# Altium footprint library USB Connectors WR-COM.PcbLib: 48 footprints (part 3 of 3)
Each footprint in its own frame and in the unit in brackets; x right, y up, seen from the top. Pads: shape width x height; smd on the part's side, far side on the other; paste and mask are expansions set on the pad; w line width, h text height; cw(c..) or ccw(c..) is an arc to the next point about the centre after c.
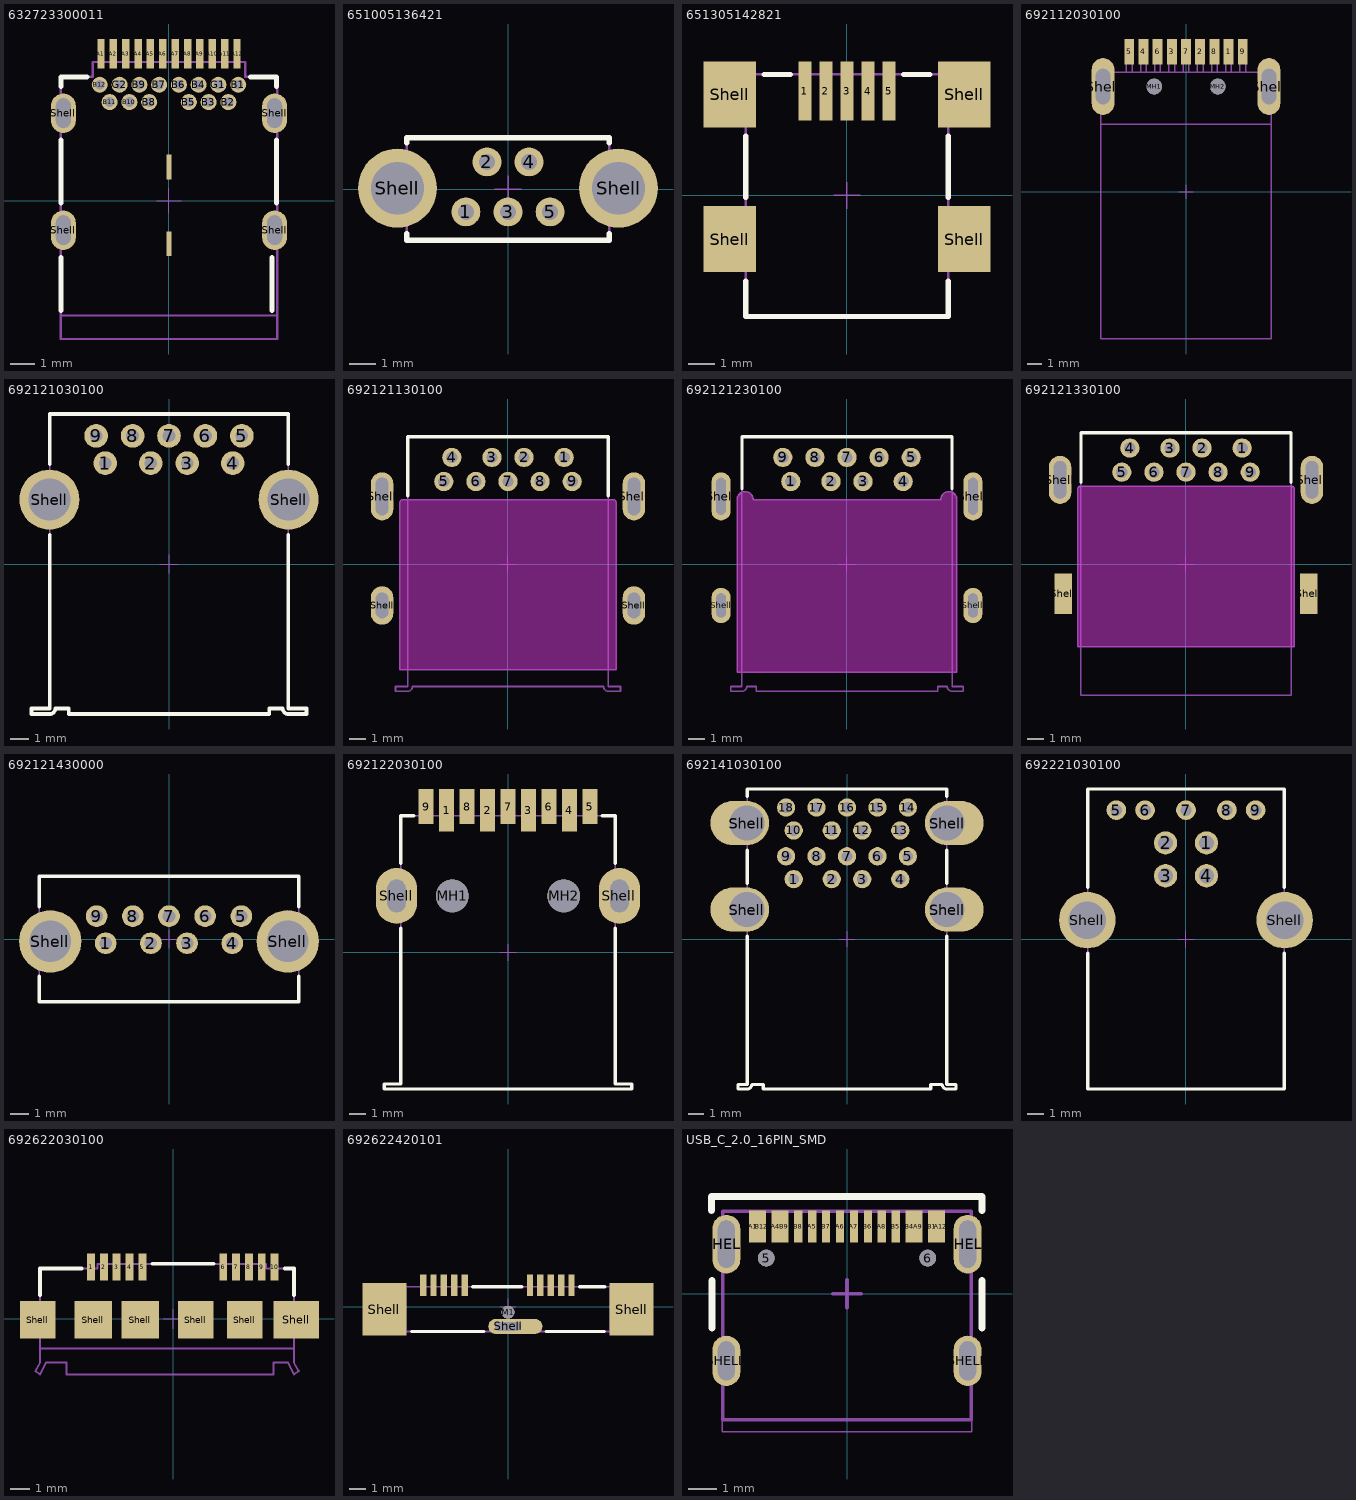
[diagram p2: the footprints below, top view; thin cyan lines are the x and y axes]

## 632723300011 [mm] "USB 3.1 Type C Receptacle Horizontal THR"
height 2.96
pads (32):
  rect 0.3x1.2 smd: A1(-2.75,5.93) A2(-2.25,5.93) A3(-1.75,5.93) A4(-1.25,5.93) A5(-0.75,5.93) A6(-0.25,5.93) A7(0.25,5.93) A8(0.75,5.93) A9(1.25,5.93) A10(1.75,5.93) A11(2.25,5.93) A12(2.75,5.93)
  round 0.65 hole 0.4: B1(2.8,4.68) B2(2.4,3.98) B3(1.6,3.98) B4(1.2,4.68) B5(0.8,3.98) B6(0.4,4.68) B7(-0.4,4.68) B8(-0.8,3.98) B9(-1.2,4.68) B10(-1.6,3.98) B11(-2.4,3.98) B12(-2.8,4.68) G1(2,4.68) G2(-2,4.68)
  oval 1x1.6 hole 0.6 slot 1.2 at 90 deg: Shell(-4.27,-1.2) Shell(-4.27,3.53) Shell(4.27,-1.2) Shell(4.27,3.53)
  rect 0.2x1 smd: Shell(0,-1.75) Shell(0,1.35)
Top Overlay:
  lines w0.2: -4.37,-4.45 -4.37,-2.3 ; -4.37,-0.1 -4.37,2.45 ; -4.37,4.6 -4.37,5 -3.32,5 ; 3.29,5 4.34,5 4.34,4.6 ; 4.17,-4.45 4.17,-2.3 ; 4.34,-0.1 4.34,2.45
Mechanical 2:
  lines w0.1: -4.37,-4.65 4.37,-4.65
  text "PCB Edge" at -1.7,-5.6 h0.61
Mechanical 13:
  lines w0.05: -2.85,5.6 -2.85,6.19 -2.65,6.19 -2.65,5.6 ; -2.35,5.6 -2.35,6.19 -2.15,6.19 -2.15,5.6 ; -1.85,5.6 -1.85,6.19 -1.65,6.19 -1.65,5.6 ; -1.35,5.6 -1.35,6.19 -1.15,6.19 -1.15,5.6 ; -0.85,5.6 -0.85,6.19 -0.65,6.19 -0.65,5.6 ; -0.35,5.6 -0.35,6.19 -0.15,6.19 -0.15,5.6 ; 0.15,5.6 0.15,6.19 0.35,6.19 0.35,5.6 ; 0.65,5.6 0.65,6.19 0.85,6.19 0.85,5.6 ; 1.15,5.6 1.15,6.19 1.35,6.19 1.35,5.6 ; 1.65,5.6 1.65,6.19 1.85,6.19 1.85,5.6 ; 2.15,5.6 2.15,6.19 2.35,6.19 2.35,5.6 ; 2.65,5.6 2.65,6.19 2.85,6.19 2.85,5.6
  lines w0.1: 4.34,-5.6 -4.37,-5.6 -4.37,5 -3.08,5 -3.08,5.6 3.08,5.6 3.08,5 4.37,5 4.37,-5.6
Mechanical 15:
  lines w0.05: -0.5,0 0.5,0 ; 0,-0.5 0,0.5
3D body "632723300011.stp": height 3.05, standoff -1.81, extent -4.37,-5.6 4.37,6.194

## 651005136421 [mm] "Mini USB 2.0 Type B Vertical 5 Contacts"
height 9.2
pads (7):
  round 1.1 hole 0.6: 1(-1.6,-0.87) 2(-0.8,1.03) 3(0,-0.87) 4(0.8,1.03) 5(1.6,-0.87)
  round 3 hole 2: Shell(-4.2,0.03) Shell(4.2,0.03)
Top Overlay:
  lines w0.2: -3.85,-1.7 -3.85,-1.95 3.85,-1.95 3.85,-1.7 ; -3.85,1.75 -3.85,1.95 3.85,1.95 3.85,1.75
Mechanical 13:
  lines w0.1: -3.85,-1.95 -3.85,1.95 3.85,1.95 3.85,-1.95 -3.85,-1.95
Mechanical 15:
  lines w0.05: -0.5,0 0.5,0 ; 0,-0.5 0,0.5
3D body "651005136421.stp": height 9.4, standoff -2.6, extent -5.099,-1.92 5.098,1.98

## 651305142821 [mm] "Mini USB 2.0 Type AB SMT Horizontal 5 Contacts"
height 4
pads (9):
  rect 0.5x2.25 smd: 1(-1.6,3.965) 2(-0.8,3.965) 3(0,3.965) 4(0.8,3.965) 5(1.6,3.965)
  rect 2x2.5 smd: Shell(-4.45,-1.66) Shell(-4.45,3.84) Shell(4.45,-1.66) Shell(4.45,3.84)
Top Overlay:
  lines w0.2: -3.85,-3.25 -3.85,-4.6 3.85,-4.6 3.85,-3.25 ; -3.85,-0.07 -3.85,2.25 ; -3.15,4.6 -2.15,4.6 ; 2.15,4.6 3.15,4.6 ; 3.85,-0.07 3.85,2.25
Mechanical 13:
  lines w0.1: -3.85,-4.6 -3.85,4.6 3.85,4.6 3.85,-4.6 -3.85,-4.6
Mechanical 15:
  lines w0.05: -0.5,0 0.5,0 ; 0,-0.5 0,0.5
3D body "651305142821.stp": height 4.1, standoff 0, extent -4.95,-4.6 4.95,4.8

## 692112030100 [mm] "USB 3.0 Type A SMT Plug with Clip"
height 4.5
pads (13):
  rect 0.7x1.8 smd: 1(3,9.875) 2(1,9.875) 3(-1,9.875) 4(-3,9.875) 5(-4,9.875) 6(-2,9.875) 7(0,9.875) 8(2,9.875) 9(4,9.875)
  round 1.1 hole 1.1 unplated: MH1(-2.25,7.425) MH2(2.25,7.425)
  oval 1.6x4 hole 1 slot 2.5 at 90 deg: Shell(-5.85,7.425) Shell(5.85,7.425)
Mechanical 2:
  lines w0.1: -6,4.775 6,4.775
  text "PCB Edge" at -1.8,3.9 h0.61
Mechanical 13:
  lines w0.1: -4.2,8.425 -4.2,10.375 -3.8,10.375 -3.8,8.425 ; -3.2,8.425 -3.2,10.375 -2.8,10.375 -2.8,8.425 ; -2.2,8.425 -2.2,10.375 -1.8,10.375 -1.8,8.425 ; -1.2,8.425 -1.2,10.375 -0.8,10.375 -0.8,8.425 ; -0.2,8.425 -0.2,10.375 0.2,10.375 0.2,8.425 ; 0.8,8.425 0.8,10.375 1.2,10.375 1.2,8.425 ; 1.8,8.425 1.8,10.375 2.2,10.375 2.2,8.425 ; 2.8,8.425 2.8,10.375 3.2,10.375 3.2,8.425 ; 3.8,8.425 3.8,10.375 4.2,10.375 4.2,8.425 ; -6,-10.375 6,-10.375 6,8.425 -6,8.425 -6,-10.375
Mechanical 15:
  lines w0.05: -0.5,0 0.5,0 ; 0,-0.5 0,0.5
3D body "692112030100.stp": height 1.84, standoff -2.66, extent -6,-10.375 6,10.375

## 692121030100 [mm] "USB 3.0 Type A Horizontal"
height 6.99
pads (11):
  round 1.3 hole 0.7: 1(-3.5,5.54) 2(-1,5.54) 3(1,5.54) 4(3.5,5.54) 5(4,7.04) 6(2,7.04) 7(0,7.04) 8(-2,7.04) 9(-4,7.04)
  round 3.3 hole 2.3: Shell(-6.57,3.54) Shell(6.57,3.54)
Top Overlay:
  lines w0.2: -6.55,1.61 -6.55,-7.94 -7.55,-7.94 -7.55,-8.24 -6.56,-8.24 ccw(c-6.55,-7.94) -6.25,-7.94 -5.5,-7.94 -5.5,-8.24 5.5,-8.24 5.5,-7.94 6.25,-7.94 ccw(c6.55,-7.94) 6.56,-8.24 7.55,-8.24 7.55,-7.94 6.55,-7.94 6.55,1.61 ; -6.55,5.47 -6.55,8.24 6.55,8.24 6.55,5.47
Mechanical 13:
  lines w0.1: -7.55,-8.24 -6.56,-8.24 ccw(c-6.55,-7.94) -6.25,-7.94 -5.5,-7.94 -5.5,-8.24 5.5,-8.24 5.5,-7.94 6.25,-7.94 ccw(c6.55,-7.94) 6.56,-8.24 7.55,-8.24 7.55,-7.94 6.55,-7.94 6.55,8.24 -6.55,8.24 -6.55,-7.94 -7.55,-7.94 -7.55,-8.24
Mechanical 15:
  lines w0.05: -0.5,0 0.5,0 ; 0,-0.5 0,0.5
3D body "692121030100.stp": height 8.03, standoff -3.19, extent -7.74,-8.24 7.74,8.31

## 692121130100 [mm] "USB 3.0 Type A Reverse Horizontal w. Offset 0.14mm"
height 5.12
pads (13):
  round 1.2 hole 0.7: 1(3.5,6.645) 2(1,6.645) 3(-1,6.645) 4(-3.5,6.645) 5(-4,5.145) 6(-2,5.145) 7(0,5.145) 8(2,5.145) 9(4,5.145)
  oval 1.4x2.4 hole 0.8 slot 1.6 at 90 deg: Shell(-7.85,-2.585) Shell(7.85,-2.585)
  oval 1.4x3 hole 0.8 slot 2.35 at 90 deg: Shell(-7.85,4.215) Shell(7.85,4.215)
Top Overlay:
  lines w0.2: -6.25,4.25 -6.25,7.935 6.25,7.935 6.25,4.25
Keep-Out Layer:
  board cut-out: -6.75,-6.585 6.75,-6.585 6.75,3.815 6.75,3.855 6.72,3.928 6.663,3.985 6.59,4.015 6.55,4.015 -6.55,4.015 -6.59,4.015 -6.663,3.985 -6.72,3.928 -6.75,3.855 -6.75,3.815
Mechanical 2:
  lines w0.1: -6.75,-6.585 6.75,-6.585 6.75,3.815 ccw(c6.55,3.815) 6.55,4.015 -6.55,4.015 ccw(c-6.55,3.815) -6.75,3.815 -6.75,-6.585
  text "PCB Cutout Area" at -4.5,-1.6 h0.81
Mechanical 13:
  lines w0.1: -7.01,-7.935 -6.26,-7.935 ccw(c-6.25,-7.635) -5.95,-7.635 5.95,-7.635 ccw(c6.25,-7.635) 6.26,-7.935 7.01,-7.935 7.01,-7.635 6.25,-7.635 6.25,7.935 -6.25,7.935 -6.25,-7.635 -7.01,-7.635 -7.01,-7.935
Mechanical 15:
  lines w0.05: -0.5,0 0.5,0 ; 0,-0.5 0,0.5
3D body "692121130100.stp": height 4.03, standoff -3.69, extent -8.078,-7.935 8.078,7.935

## 692121230100 [mm] "USB 3.0 Type A Horizontal with Offset 1.04mm"
height 3.9
pads (13):
  round 1.2 hole 0.7: 1(-3.5,5.145) 2(-1,5.145) 3(1,5.145) 4(3.5,5.145) 5(4,6.645) 6(2,6.645) 7(0,6.645) 8(-2,6.645) 9(-4,6.645)
  oval 1.2x2.2 hole 0.6 slot 1.5 at 90 deg: Shell(-7.85,-2.585) Shell(7.85,-2.585)
  oval 1.2x3 hole 0.6 slot 2.3 at 90 deg: Shell(-7.85,4.215) Shell(7.85,4.215)
Top Overlay:
  lines w0.2: -6.55,4.685 -6.55,7.935 6.55,7.935 6.55,4.685
Keep-Out Layer:
  board cut-out: -6.85,-6.755 6.85,-6.755 6.85,4.015 6.85,4.115 6.774,4.298 6.633,4.439 6.449,4.515 6.251,4.515 6.067,4.439 5.926,4.298 5.85,4.115 5.85,4.015 -5.85,4.015 -5.85,4.115 -5.926,4.298 -6.067,4.439 -6.251,4.515 -6.449,4.515 -6.633,4.439 -6.774,4.298 -6.85,4.115 -6.85,4.015
Mechanical 2:
  lines w0.1: -6.85,-6.755 6.85,-6.755 6.85,4.015 ccw(c6.35,4.015) 5.85,4.015 -5.85,4.015 ccw(c-6.35,4.015) -6.85,4.015 -6.85,-6.755
  text "PCB Cutout Area" at -4.4,-1.3 h0.81
Mechanical 13:
  lines w0.1: -7.25,-7.935 -6.56,-7.935 ccw(c-6.55,-7.635) -6.25,-7.635 -5.65,-7.635 -5.65,-7.935 5.65,-7.935 5.65,-7.635 6.25,-7.635 ccw(c6.55,-7.635) 6.56,-7.935 7.25,-7.935 7.25,-7.635 6.55,-7.635 6.55,7.935 -6.55,7.935 -6.55,-7.635 -7.25,-7.635 -7.25,-7.935
Mechanical 15:
  lines w0.05: -0.5,0 0.5,0 ; 0,-0.5 0,0.5
3D body "692121230100.stp": height 4.63, standoff -2.49, extent -8,-7.935 8,7.935

## 692121330100 [mm] "USB 3.0 Type A Reverse Horizontal with Offset 1.75mm"
height 7.4
pads (13):
  round 1.2 hole 0.7: 1(3.5,7.225) 2(1,7.225) 3(-1,7.225) 4(-3.5,7.225) 5(-4,5.725) 6(-2,5.725) 7(0,5.725) 8(2,5.725) 9(4,5.725)
  oval 1.4x3 hole 0.8 slot 2.35 at 90 deg: Shell(-7.85,5.245) Shell(7.85,5.245)
  rect 1.1x2.5 smd: Shell(-7.65,-1.855) Shell(7.65,-1.855)
Top Overlay:
  lines w0.2: -6.55,5.1 -6.55,8.185 6.55,8.185 6.55,5.1
Keep-Out Layer:
  board cut-out: -6.75,-5.155 -6.75,4.675 -6.75,4.709 -6.724,4.771 -6.676,4.819 -6.614,4.845 -6.58,4.845 6.58,4.845 6.614,4.845 6.676,4.819 6.724,4.771 6.75,4.709 6.75,4.675 6.75,-5.155
Mechanical 2:
  lines w0.1: -6.75,-5.155 6.75,-5.155 6.75,4.675 ccw(c6.58,4.675) 6.58,4.845 -6.58,4.845 ccw(c-6.58,4.675) -6.75,4.675 -6.75,-5.155
  text "PCB Cutout Area" at -4.5,-0.3 h0.81
Mechanical 13:
  lines w0.1: -6.55,-8.185 6.55,-8.185 6.55,8.185 -6.55,8.185 -6.55,-8.185
Mechanical 15:
  lines w0.05: -0.5,0 0.5,0 ; 0,-0.5 0,0.5
3D body "692121330100.stp": height 2.98, standoff -4.42, extent -8,-8.185 8,8.185

## 692121430000 [mm] "USB 3.0 Type A Vertical THT"
height 15
pads (11):
  round 1.2 hole 0.7: 1(-3.5,-0.235) 2(-1,-0.235) 3(1,-0.235) 4(3.5,-0.235) 5(4,1.265) 6(2,1.265) 7(0,1.265) 8(-2,1.265) 9(-4,1.265)
  round 3.45 hole 2.3: Shell(-6.57,-0.135) Shell(6.57,-0.135)
Top Overlay:
  lines w0.2: -7.175,-2.075 -7.175,-3.475 7.175,-3.475 7.175,-2.075 ; -7.175,1.775 -7.175,3.475 7.175,3.475 7.175,1.775
Mechanical 13:
  lines w0.1: -7.175,-3.475 -7.175,3.475 7.175,3.475 7.175,-3.475 -7.175,-3.475
Mechanical 15:
  lines w0.05: -0.5,0 0.5,0 ; 0,-0.5 0,0.5
3D body "692121430000.stp": height 15.03, standoff -3.74, extent -7.8,-3.475 7.8,3.475

## 692122030100 [mm] "USB 3.0 Type A Horizontal SMD"
height 6.99
pads (13):
  rect 0.9x2.6 smd: 1(-3.75,8.67) 2(-1.25,8.67) 3(1.25,8.67) 4(3.75,8.67)
  rect 0.9x2.15 smd: 5(5,8.895) 6(2.5,8.895) 7(0,8.895) 8(-2.5,8.895) 9(-5,8.895)
  round 2 hole 2 unplated: MH1(-3.4,3.45) MH2(3.4,3.45)
  oval 2.52x3.4 hole 1.12 slot 2 at 90 deg: Shell(-6.8,3.45) Shell(6.8,3.45)
Top Overlay:
  lines w0.2: -6.55,1.47 -6.55,-8.03 -7.55,-8.03 -7.55,-8.33 7.55,-8.33 7.55,-8.03 6.55,-8.03 6.55,1.47 ; -6.55,5.43 -6.55,8.33 -5.75,8.33 ; 5.75,8.33 6.55,8.33 6.55,5.43
Mechanical 13:
  lines w0.1: -5.25,8.33 -5.25,9.47 -4.75,9.47 -4.75,8.33 ; -4,8.33 -4,9.47 -3.5,9.47 -3.5,8.33 ; -2.75,8.33 -2.75,9.47 -2.25,9.47 -2.25,8.33 ; -1.5,8.33 -1.5,9.47 -1,9.47 -1,8.33 ; -0.25,8.33 -0.25,9.47 0.25,9.47 0.25,8.33 ; 1,8.33 1,9.47 1.5,9.47 1.5,8.33 ; 2.25,8.33 2.25,9.47 2.75,9.47 2.75,8.33 ; 3.5,8.33 3.5,9.47 4,9.47 4,8.33 ; 4.75,8.33 4.75,9.47 5.25,9.47 5.25,8.33 ; -7.55,-8.33 -7.55,-8.03 -6.55,-8.03 -6.55,8.33 6.55,8.33 6.55,-8.03 7.55,-8.03 7.55,-8.33 -7.55,-8.33
Mechanical 15:
  lines w0.05: -0.5,0 0.5,0 ; 0,-0.5 0,0.5
3D body "692122030100.stp": height 7.95, standoff -2.29, extent -7.55,-8.33 7.55,9.47

## 692141030100 [mm] "USB 3.0 Type A Stacked"
height 15.42
pads (22):
  round 1.2 hole 0.7: 1(-3.5,3.93) 2(-1,3.93) 3(1,3.93) 4(3.5,3.93) 5(4,5.43) 6(2,5.43) 7(0,5.43) 8(-2,5.43) 9(-4,5.43) 10(-3.5,7.13) 11(-1,7.13) 12(1,7.13) 13(3.5,7.13) 14(4,8.63) 15(2,8.63) 16(0,8.63) 17(-2,8.63) 18(-4,8.63)
  oval 3.85x2.9 hole 2.3 copper offset -0.475,0: Shell(-6.57,1.93) Shell(-6.57,7.61)
  oval 3.85x2.9 hole 2.3 copper offset 0.475,0: Shell(6.57,1.93) Shell(6.57,7.61)
Top Overlay:
  lines w0.2: -6.55,0.2 -6.55,-9.55 -7.15,-9.55 -7.15,-9.85 -6.56,-9.85 ccw(c-6.55,-9.55) -6.25,-9.55 -5.5,-9.55 -5.5,-9.85 5.5,-9.85 5.5,-9.55 6.25,-9.55 ccw(c6.55,-9.55) 6.56,-9.85 7.15,-9.85 7.15,-9.55 6.55,-9.55 6.55,0.2 ; -6.55,3.66 -6.55,5.85 ; -6.55,9.35 -6.55,9.85 6.55,9.85 6.55,9.35 ; 6.55,3.66 6.55,5.85
Mechanical 13:
  lines w0.1: -7.15,-9.85 -7.15,-9.55 -6.55,-9.55 -6.55,9.85 6.55,9.85 6.55,-9.55 7.15,-9.55 7.15,-9.85 6.56,-9.85 cw(c6.55,-9.55) 6.25,-9.55 5.5,-9.55 5.5,-9.85 -5.5,-9.85 -5.5,-9.55 -6.25,-9.55 cw(c-6.55,-9.55) -6.56,-9.85 -7.15,-9.85
Mechanical 15:
  lines w0.05: -0.5,0 0.5,0 ; 0,-0.5 0,0.5
3D body "692141030100.stp": height 16.13, standoff -3.48, extent -7.794,-9.85 7.794,9.85

## 692221030100 [mm] "USB 3.0 Type B Horizontal"
height 12.9
pads (11):
  round 1.42 hole 0.92: 1(1.25,5.86) 2(-1.25,5.86) 3(-1.25,3.86) 4(1.25,3.86)
  round 1.2 hole 0.7: 5(-4.25,7.86) 6(-2.5,7.86) 7(0,7.86) 8(2.5,7.86) 9(4.25,7.86)
  round 3.45 hole 2.3: Shell(-6.02,1.15) Shell(6.02,1.15)
Top Overlay:
  lines w0.2: -6,-0.85 -6,-9.15 6,-9.15 6,-0.85 ; -6,3.15 -6,9.15 6,9.15 6,3.15
Mechanical 13:
  lines w0.1: -6,-9.15 6,-9.15 6,9.15 -6,9.15 -6,-9.15
Mechanical 15:
  lines w0.05: -0.5,0 0.5,0 ; 0,-0.5 0,0.5
3D body "692221030100.stp": height 12.93, standoff -3.2, extent -7.2,-9.15 7.2,9.15

## 692622030100 [mm] "Micro USB 3.0 Type B Horizontal SMT"
height 2.58
pads (16):
  rect 0.4x1.35 smd: 1(-4.17,2.63) 2(-3.52,2.63) 3(-2.87,2.63) 4(-2.22,2.63) 5(-1.57,2.63) 6(2.53,2.63) 7(3.18,2.63) 8(3.83,2.63) 9(4.48,2.63) 10(5.13,2.63)
  rect 1.8x1.9 smd: Shell(-6.87,-0.045) Shell(1.13,-0.045) Shell(3.63,-0.045)
  rect 1.9x1.9 smd: Shell(-4.07,-0.045) Shell(-1.67,-0.045)
  rect 2.3x1.9 smd: Shell(6.23,-0.045)
Top Overlay:
  lines w0.2: -6.745,1.2 -6.745,2.545 -4.65,2.545 ; -1.05,2.795 2.03,2.795 ; 5.65,2.545 6.105,2.545 6.105,1.2
Mechanical 2:
  lines w0.1: -6.745,-1.495 6.105,-1.495
  text "PCB Edge" at -1.9,-2.4 h0.61
Top Designator:
  text ".Designator" at -5.998,-0.4 h1.2
Mechanical 13:
  lines w0.1: -6.995,-2.645 -6.745,-2.205 -6.745,2.545 -3.85,2.545 -3.85,2.795 4.7,2.795 4.7,2.545 6.105,2.545 6.105,-2.205 6.355,-2.645 6.105,-2.805 5.805,-2.205 5.065,-2.205 5.065,-2.805 -5.405,-2.805 -5.405,-2.205 -6.445,-2.205 -6.745,-2.805 -6.995,-2.645
Mechanical 15:
  lines w0.05: -0.5,0 0.5,0 ; 0,-0.5 0,0.5
3D body "692622030100.stp": height 2.77, standoff -0.18, extent -6.87,-2.795 6.872,2.807

## 692622420101 [mm] "Micro USB 3.0 Type B Vertical SMT"
height 5.15
pads (14):
  rect 0.4x1.35 smd: 1(3.98,1.34) 2(3.33,1.34) 3(2.68,1.34) 4(2.03,1.34) 5(1.38,1.34) 6(-2.72,1.34) 7(-3.37,1.34) 8(-4.02,1.34) 9(-4.67,1.34) 10(-5.32,1.34)
  round 0.8 hole 0.8 unplated: M1(0,-0.35)
  rect 2.75x3.3 smd: Shell(-7.75,-0.16) Shell(7.75,-0.16)
  oval 3.4x0.95 hole 0.55 slot 1.6 at 0 deg copper offset 0.46,0: Shell(0,-1.24)
Top Overlay:
  lines w0.2: -6.05,-1.56 -1.5,-1.56 ; -2.225,1.24 0.875,1.24 ; 2.4,-1.56 6.05,-1.56 ; 4.475,1.24 6.075,1.24
Top Designator:
  text ".Designator" at -5.998,-0.4 h1.2
Mechanical 13:
  lines w0.1: -6.425,-1.56 -6.425,1.24 6.425,1.24 6.425,-1.56 -6.425,-1.56
Mechanical 15:
  lines w0.05: -0.5,0 0.5,0 ; 0,-0.5 0,0.5
3D body "692622420101.stp": height 5.82, standoff -0.83, extent -8.7,-1.75 8.7,1.75

## PCBComponent_1 [mm]

## USB_C_2.0_16PIN_SMD [mm]
pads (22):
  round 0.6 hole 0.6: 5(-2.89,1.278) 6(2.89,1.278)
  rect 0.3x1.15 smd: A1(-3.35,2.403) A4(-2.55,2.403) A5(-1.25,2.403) A6(-0.25,2.403) A7(0.25,2.403) A8(1.25,2.403) A9(2.55,2.403) A12(3.35,2.403) B1(3.05,2.403) B4(2.25,2.403) B5(1.75,2.403) B6(0.75,2.403) B7(-0.75,2.403) B8(-1.75,2.403) B9(-2.25,2.403) B12(-3.05,2.403)
  oval 1x1.8 hole 0.6 slot 1.4 at 90 deg: SHELL(-4.32,-2.402) SHELL(4.32,-2.402)
  oval 1x2.1 hole 0.6 slot 1.7 at 90 deg: SHELL(-4.32,1.778) SHELL(4.32,1.778)
Top Overlay:
  lines w0.254: -4.851,2.988 -4.851,3.488 4.826,3.488 4.826,2.988 ; -4.826,-1.229 -4.826,0.473 ; 4.826,-1.229 4.826,0.473
Mechanical 1:
  lines w0.051: -4.47,-4.937 -4.47,-3.489 -4.47,2.962 4.47,2.962 4.47,-4.937 -4.47,-4.937
Top Designator:
  text ".Designator" at -5.998,-0.4 h1.2
Mechanical 15:
  lines w0.127: -0.508,0 0.508,0 ; 0,-0.508 0,0.508 ; -4.445,-4.505 -4.445,2.946 4.445,2.946 4.445,-4.505 -4.445,-4.505
  text "PCB EDGE" at -2.92,-4.165 h0.76
3D body "USB Type C Port (SMD Type).STEP": height 3.2, standoff -1, extent -4.47,-4.95 4.47,2.95